# Altium footprint library mechanical.PcbLib: 1 footprints
Each footprint in its own frame and in the unit in brackets; x right, y up, seen from the top. Pads: shape width x height; smd on the part's side, far side on the other; paste and mask are expansions set on the pad; w line width, h text height; cw(c..) or ccw(c..) is an arc to the next point about the centre after c.
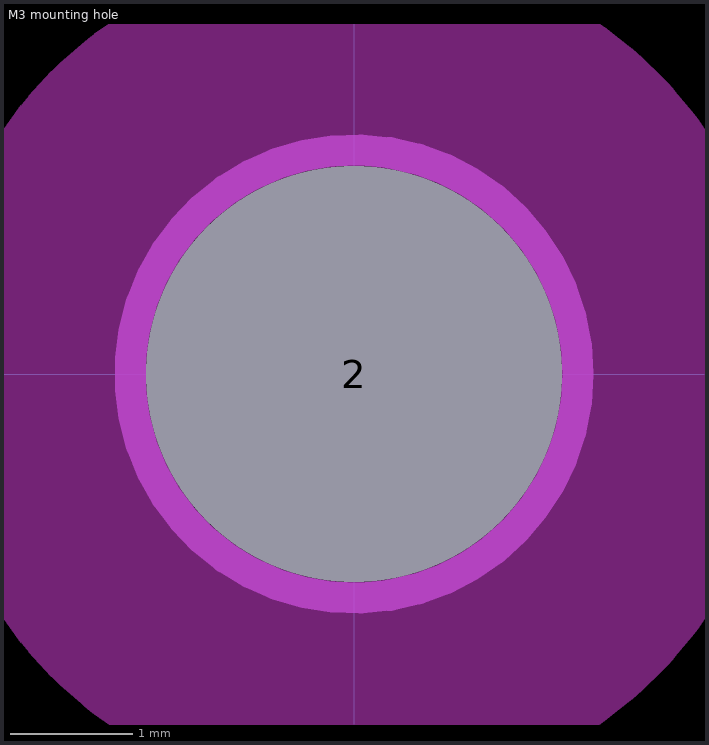
[diagram p0: the footprint, top view; thin cyan lines are the x and y axes]

## M3 mounting hole [mm]
pads (1):
  round 2.5 hole 3.4 unplated mask+0: 2(0,0)
Keep-Out Layer:
  circle w1.8: c0,0 r2.6
Mechanical 1:
  circle w0.254: c0,0 r1.832